# Altium footprint library P_HEADER_2x8_2.54.PcbLib: 1 footprints
Each footprint in its own frame and in the unit in brackets; x right, y up, seen from the top. Pads: shape width x height; smd on the part's side, far side on the other; paste and mask are expansions set on the pad; w line width, h text height; cw(c..) or ccw(c..) is an arc to the next point about the centre after c.
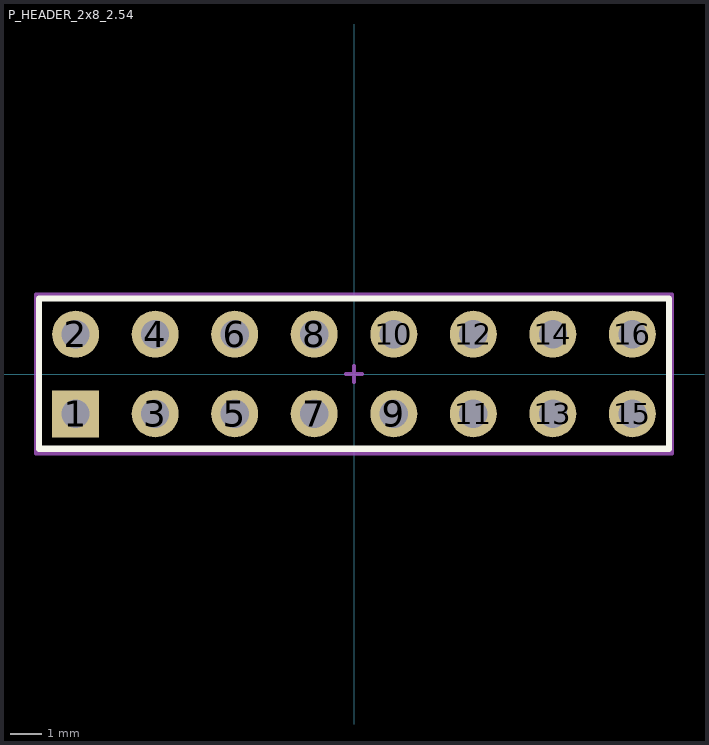
[diagram p0: the footprint, top view; thin cyan lines are the x and y axes]

## P_HEADER_2x8_2.54 [mm] "Connector; Header; 2x8 Position; Male"
pads (16):
  rect 1.5x1.5 hole 0.9: 1(-8.89,-1.27)
  round 1.5 hole 0.9: 2(-8.89,1.27) 3(-6.35,-1.27) 4(-6.35,1.27) 5(-3.81,-1.27) 6(-3.81,1.27) 7(-1.27,-1.27) 8(-1.27,1.27) 9(1.27,-1.27) 10(1.27,1.27) 11(3.81,-1.27) 12(3.81,1.27) 13(6.35,-1.27) 14(6.35,1.27) 15(8.89,-1.27) 16(8.89,1.27)
Top Overlay:
  lines w0.2: -10.058,-2.388 -10.058,2.413 10.058,2.413 10.058,-2.388 -10.058,-2.388
Mechanical 13:
  lines w0.127: -10.16,2.511 10.16,2.511 10.16,-2.54 -10.16,-2.54 -10.16,2.511 ; -10.16,2.511 -10.16,2.511
Mechanical 15:
  lines w0.127: -0.254,0 0.254,0 ; 0,-0.254 0,0.254 ; -10.16,-2.54 10.16,-2.54 10.16,2.54 -10.16,2.54 -10.16,-2.54
3D body "User Library-PLD-xx (2).step": height 8.4, standoff -3, extent -10.16,-2.489 10.16,2.511